# Altium footprint library Connectors.PcbLib: 120 footprints (part 2 of 8)
Each footprint in its own frame and in the unit in brackets; x right, y up, seen from the top. Pads: shape width x height; smd on the part's side, far side on the other; paste and mask are expansions set on the pad; w line width, h text height; cw(c..) or ccw(c..) is an arc to the next point about the centre after c.
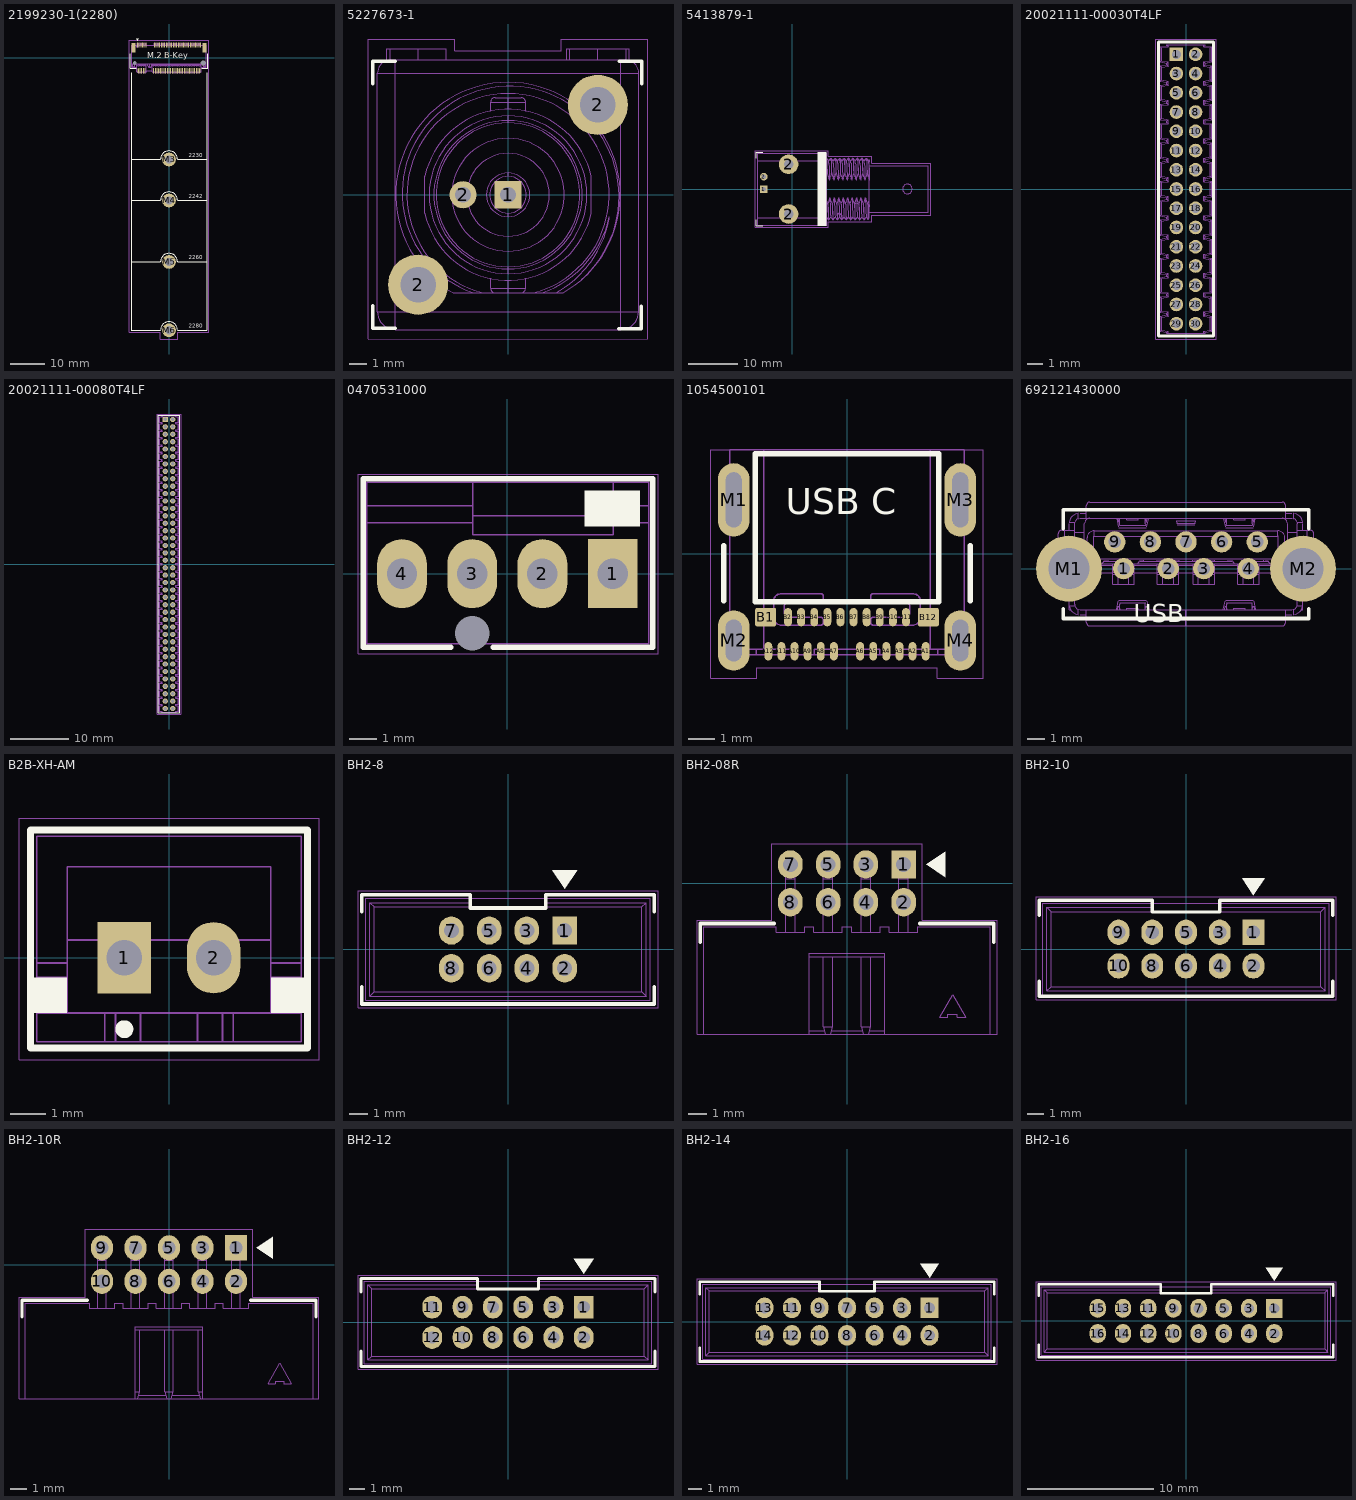
[diagram p1: the footprints below, top view; thin cyan lines are the x and y axes]

## 2199230-1(2280) [mm] "TE Conn M.2 B Key"
pads (75):
  rect 0x0 hole 1.1 unplated paste-2539.97 mask+0.05: 0(-10,-1.5)
  rect 0x0 hole 1.6 unplated paste-2539.97 mask+0.05: 0(10,-1.5)
  rect 0.3x1.55 smd paste+0 mask+0.05: 1(-9.25,3.775)
  oval 0.3x1.55 smd paste+0 mask+0.05: 2(-9,-3.775) 3(-8.75,3.775) 4(-8.5,-3.775) 5(-8.25,3.775) 6(-8,-3.775) 7(-7.75,3.775) 8(-7.5,-3.775) 9(-7.25,3.775) 10(-7,-3.775) 11(-6.75,3.775) 20(-4.5,-3.775) 21(-4.25,3.775) 22(-4,-3.775) 23(-3.75,3.775) 24(-3.5,-3.775) 25(-3.25,3.775) 26(-3,-3.775) 27(-2.75,3.775) 28(-2.5,-3.775) 29(-2.25,3.775) 30(-2,-3.775) 31(-1.75,3.775) 32(-1.5,-3.775) 33(-1.25,3.775) 34(-1,-3.775) 35(-0.75,3.775) 36(-0.5,-3.775) 37(-0.25,3.775) 38(0,-3.775) 39(0.25,3.775) 40(0.5,-3.775) 41(0.75,3.775) 42(1,-3.775) 43(1.25,3.775) 44(1.5,-3.775) 45(1.75,3.775) 46(2,-3.775) 47(2.25,3.775) 48(2.5,-3.775) 49(2.75,3.775) 50(3,-3.775) 51(3.25,3.775) 52(3.5,-3.775) 53(3.75,3.775) 54(4,-3.775) 55(4.25,3.775) 56(4.5,-3.775) 57(4.75,3.775) 58(5,-3.775) 59(5.25,3.775) 60(5.5,-3.775) 61(5.75,3.775) 62(6,-3.775) 63(6.25,3.775) 64(6.5,-3.775) 65(6.75,3.775) 66(7,-3.775) 67(7.25,3.775) 68(7.5,-3.775) 69(7.75,3.775) 70(8,-3.775) 71(8.25,3.775) 72(8.5,-3.775) 73(8.75,3.775) 74(9,-3.775) 75(9.25,3.775)
  rect 1.2x2.75 smd paste+0 mask+0.05: M1(-10.35,3) M2(10.35,3)
  round 4 hole 2.4 paste-2539.97 mask+0.05: M3(0,-29.75) M4(0,-41.75) M5(0,-59.75) M6(0,-79.75)
Top Overlay:
  region: -9.25,5.025 -8.85,5.525 -9.65,5.525
  lines w0.2: -11.3,1.2 -11.3,-3.1 -9.6,-3.1 ; -11,-59.75 -2.5,-59.75 cw(c0,-59.75) 2.5,-59.75 11,-59.75 ; -11,-41.75 -2.5,-41.75 cw(c0,-41.75) 2.5,-41.75 11,-41.75 ; -11,-29.75 -2.5,-29.75 cw(c0,-29.75) 2.5,-29.75 11,-29.75 ; -11,-4.35 -11,-79.75 -2.5,-79.75 cw(c0,-79.75) 2.5,-79.75 11,-79.75 11,-4.35 ; 9.6,-3.1 11.3,-3.1 11.3,1.2
  text "M.2 B-Key" at -6.373,-0.683 h3
  text "2280" at 5.75,-79.464 h2
  text "2260" at 5.75,-59.464 h2
  text "2242" at 5.75,-41.464 h2
  text "2230" at 5.75,-29.464 h2
Top Courtyard:
  lines w0.025: -11.6,-80.3 -2.5,-80.3 -2.5,-82.3 2.5,-82.3 2.5,-80.3 11.6,-80.3 11.6,5.2 -11.6,5.2 -11.6,-80.3
Top Assembly:
  drawing of 707 lines, arcs and shapes, not listed
  text ".Designator" at -4.511,0.547 h2
3D body "2199230-1.x_t": height 4.09, standoff -0.62, extent -10.95,-4.35 10.95,4.35

## 5227673-1 [mm] "BNC Connector"
height 0.6
pads (4):
  rect 1.53x1.53 hole 0.9: 1(0,0)
  round 3.4 hole 2: 2(-5.08,-5.08) 2(5.08,5.08)
  round 1.53 hole 0.9: 2(-2.54,0)
Top Overlay:
  lines w0.2: -7.65,-6.28 -7.65,-7.55 -6.38,-7.55 ; -7.65,6.28 -7.65,7.55 -6.38,7.55 ; 6.255,-7.575 7.525,-7.575 7.525,-6.305 ; 6.28,7.55 7.55,7.55 7.55,6.28
Top Courtyard:
  lines w0.025: -7.9,-8.15 7.9,-8.15 7.9,8.8 3,8.8 3,8.15 -3,8.15 -3,8.8 -7.9,8.8 -7.9,-8.15
Top Assembly:
  drawing of 540 lines, arcs and shapes, not listed
  text ".Designator" at -6.763,8.321 h3
3D body "c-5227673-1-b-3d.x_t": height 35.65, standoff -5.64, extent -7.38,-7.62 7.38,8.26

## 5413879-1 [mm] "BNC Connector"
height 0.6
pads (4):
  rect 1.53x1.53 hole 0.9: 1(-5.779,0)
  round 1.53 hole 0.9: 2(-5.779,2.54)
  round 4 hole 2 unplated: 2(-0.699,-5.08) 2(-0.699,5.08)
Top Overlay:
  rectangle: 5.2,-7.546 7.002,7.579
  lines w0.2: -7.274,-6.251 -7.274,-7.521 -6.004,-7.521 ; -7.274,6.309 -7.274,7.579 -6.004,7.579
Top Courtyard:
  lines w0.05: -7.5,-7.8 7.4,-7.8 7.4,-6.7 16.3,-6.7 16.3,-5.3 28.3,-5.3 28.3,5.3 16.3,5.3 16.3,6.7 7.4,6.7 7.4,7.8 -7.5,7.8 -7.5,-7.8
Top Assembly:
  drawing of 1243 lines, arcs and shapes, not listed
  text ".Designator" at -8.645,-0.877 h4
3D body "5413879-1.x_t": height 12.79, standoff -4.02, extent -7.048,-7.378 27.877,7.379

## 20021111-00030T4LF [mm] "Header 2x30 1.27 mm, VT TH"
height 5.55
pads (30):
  rect 0.9x0.9 hole 0.6: 1(-0.635,8.89)
  round 0.9 hole 0.6: 2(0.635,8.89) 3(-0.635,7.62) 4(0.635,7.62) 5(-0.635,6.35) 6(0.635,6.35) 7(-0.635,5.08) 8(0.635,5.08) 9(-0.635,3.81) 10(0.635,3.81) 11(-0.635,2.54) 12(0.635,2.54) 13(-0.635,1.27) 14(0.635,1.27) 15(-0.635,0) 16(0.635,0) 17(-0.635,-1.27) 18(0.635,-1.27) 19(-0.635,-2.54) 20(0.635,-2.54) 21(-0.635,-3.81) 22(0.635,-3.81) 23(-0.635,-5.08) 24(0.635,-5.08) 25(-0.635,-6.35) 26(0.635,-6.35) 27(-0.635,-7.62) 28(0.635,-7.62) 29(-0.635,-8.89) 30(0.635,-8.89)
Top Overlay:
  lines w0.2: -1.8,-9.7 1.8,-9.7 1.8,9.7 -1.8,9.7 -1.8,-9.7
Top Courtyard:
  lines w0.025: -2,-9.9 -2,9.9 2,9.9 2,-9.9 -2,-9.9
Top Assembly:
  drawing of 728 lines, arcs and shapes, not listed
  text ".Designator" at 3.453,-4.511 h2
3D body "20021111-00030T4LF.x_t": height 5.55, standoff -2.3, extent -1.715,-9.525 1.715,9.525

## 20021111-00080T4LF [mm] "Header 2x40 1.27 mm, VT TH"
height 5.55
pads (80):
  rect 0.9x0.9 hole 0.6: 1(-0.635,24.765)
  round 0.9 hole 0.6: 2(0.635,24.765) 3(-0.635,23.495) 4(0.635,23.495) 5(-0.635,22.225) 6(0.635,22.225) 7(-0.635,20.955) 8(0.635,20.955) 9(-0.635,19.685) 10(0.635,19.685) 11(-0.635,18.415) 12(0.635,18.415) 13(-0.635,17.145) 14(0.635,17.145) 15(-0.635,15.875) 16(0.635,15.875) 17(-0.635,14.605) 18(0.635,14.605) 19(-0.635,13.335) 20(0.635,13.335) 21(-0.635,12.065) 22(0.635,12.065) 23(-0.635,10.795) 24(0.635,10.795) 25(-0.635,9.525) 26(0.635,9.525) 27(-0.635,8.255) 28(0.635,8.255) 29(-0.635,6.985) 30(0.635,6.985) 31(-0.635,5.715) 32(0.635,5.715) 33(-0.635,4.445) 34(0.635,4.445) 35(-0.635,3.175) 36(0.635,3.175) 37(-0.635,1.905) 38(0.635,1.905) 39(-0.635,0.635) 40(0.635,0.635) 41(-0.635,-0.635) 42(0.635,-0.635) 43(-0.635,-1.905) 44(0.635,-1.905) 45(-0.635,-3.175) 46(0.635,-3.175) 47(-0.635,-4.445) 48(0.635,-4.445) 49(-0.635,-5.715) 50(0.635,-5.715) 51(-0.635,-6.985) 52(0.635,-6.985) 53(-0.635,-8.255) 54(0.635,-8.255) 55(-0.635,-9.525) 56(0.635,-9.525) 57(-0.635,-10.795) 58(0.635,-10.795) 59(-0.635,-12.065) 60(0.635,-12.065) 61(-0.635,-13.335) 62(0.635,-13.335) 63(-0.635,-14.605) 64(0.635,-14.605) 65(-0.635,-15.875) 66(0.635,-15.875) 67(-0.635,-17.145) 68(0.635,-17.145) 69(-0.635,-18.415) 70(0.635,-18.415) 71(-0.635,-19.685) 72(0.635,-19.685) 73(-0.635,-20.955) 74(0.635,-20.955) 75(-0.635,-22.225) 76(0.635,-22.225) 77(-0.635,-23.495) 78(0.635,-23.495) 79(-0.635,-24.765) 80(0.635,-24.765)
Top Overlay:
  lines w0.2: -1.8,-25.5 -1.8,25.5 1.8,25.5 1.8,-25.5 -1.8,-25.5
Top Courtyard:
  lines w0.025: -2,-25.7 -2,25.7 2,25.7 2,-25.7 -2,-25.7
Top Assembly:
  drawing of 1928 lines, arcs and shapes, not listed
  text ".Designator" at 3.453,-4.511 h2
3D body "20021111-00080T4LF.x_t": height 5.55, standoff -2.3, extent -1.715,-25.4 1.715,25.4

## 0470531000 [mm]
height 0.6
pads (5):
  round 0 hole 1.25: 0(-1.27,-2.16)
  rect 1.8x2.5 hole 1.1: 1(3.81,0)
  oval 1.8x2.5 hole 1.1: 2(1.27,0) 3(-1.27,0) 4(-3.81,0)
Top Overlay:
  rectangle: 2.8,1.7 4.8,3
  lines w0.2: -2.05,-2.667 -5.207,-2.667 -5.207,-2.286 -5.207,3.429 5.258,3.429 5.258,-2.667 -0.5,-2.667
Top Courtyard:
  lines w0.025: -5.4,-2.9 5.45,-2.9 5.45,3.6 -5.4,3.6 -5.4,-2.9
Top Assembly:
  lines w0.05: -1.25,1.85 -5.08,1.85 ; -1.25,2.45 -5.08,2.45 ; 3.83,1.85 5.12,1.85 ; 3.83,2.45 5.12,2.45 ; -5.08,1.85 -5.08,-2.54 5.12,-2.54 5.12,1.85 ; -5.08,1.85 -5.08,2.45 ; -5.08,2.45 -5.08,3.3 -1.25,3.3 ; -4.115,-0.325 -4.115,0.325 ; -4.115,-0.325 -3.465,-0.325 ; -4.115,-0.325 -3.914,-0.124 ; -4.115,0.325 -3.465,0.325 ; -4.115,0.325 -3.914,0.124 ; -3.914,-0.124 -3.914,0.124 ; -3.914,-0.124 -3.666,-0.124 ; -3.914,0.124 -3.666,0.124 ; -3.666,-0.124 -3.666,0.124 ; -3.666,-0.124 -3.465,-0.325 ; -3.666,0.124 -3.465,0.325 ; -3.465,-0.325 -3.465,0.325 ; -1.575,-0.325 -0.925,-0.325 ; -1.575,-0.325 -1.575,0.325 ; -1.575,-0.325 -1.374,-0.124 ; -1.575,0.325 -0.925,0.325 ; -1.575,0.325 -1.374,0.124 ; -1.374,-0.124 -1.126,-0.124 ; -1.374,-0.124 -1.374,0.124 ; -1.374,0.124 -1.126,0.124 ; -1.25,2.1 3.83,2.1 ; -1.25,2.1 -1.25,1.4 3.83,1.4 3.83,2.1 ; -1.25,2.1 -1.25,3.3 ; -1.25,3.3 3.83,3.3 ; -1.126,-0.124 -1.126,0.124 ; -1.126,-0.124 -0.925,-0.325 ; -1.126,0.124 -0.925,0.325 ; -0.925,-0.325 -0.925,0.325 ; 0.965,-0.325 0.965,0.325 ; 0.965,-0.325 1.615,-0.325 ; 0.965,-0.325 1.166,-0.124 ; 0.965,0.325 1.615,0.325 ; 0.965,0.325 1.166,0.124 ; 1.166,-0.124 1.166,0.124 ; 1.166,-0.124 1.414,-0.124 ; 1.166,0.124 1.414,0.124 ; 1.414,-0.124 1.414,0.124 ; 1.414,-0.124 1.615,-0.325 ; 1.414,0.124 1.615,0.325 ; 1.615,-0.325 1.615,0.325 ; 3.505,-0.325 3.505,0.325 ; 3.505,-0.325 4.155,-0.325 ; 3.505,-0.325 3.706,-0.124 ; 3.505,0.325 4.155,0.325 ; 3.505,0.325 3.706,0.124 ; 3.706,-0.124 3.706,0.124 ; 3.706,-0.124 3.954,-0.124 ; 3.706,0.124 3.954,0.124 ; 3.83,2.1 3.83,3.3 ; 3.83,3.3 5.12,3.3 5.12,2.45 ; 3.954,-0.124 3.954,0.124 ; 3.954,-0.124 4.155,-0.325 ; 3.954,0.124 4.155,0.325 ; 4.155,-0.325 4.155,0.325 ; 5.12,1.85 5.12,2.45
  text ".Designator" at -4.257,-1.85 h2
3D body "470531000.x_t": height 10.5, standoff -3, extent -5.08,-2.54 5.12,3.3

## 1054500101 [mm] "USB TYPE C"
pads (28):
  oval 0.3x0.7 smd paste+0 mask+0.05: A1(3,-3.727) A2(2.5,-3.727) A3(2,-3.727) A4(1.5,-3.727) A5(1,-3.727) A6(0.5,-3.727) A7(-0.5,-3.727) A8(-1,-3.727) A9(-1.5,-3.727) A10(-2,-3.727) A11(-2.5,-3.727) A12(-3,-3.727) B2(-2.25,-2.427) B3(-1.75,-2.427) B4(-1.25,-2.427) B5(-0.75,-2.427) B6(-0.25,-2.427) B7(0.25,-2.427) B8(0.75,-2.427) B9(1.25,-2.427) B10(1.75,-2.427) B11(2.25,-2.427)
  rrect20% 0.8x0.7 smd paste+0 mask+0.05: B1(-3.1,-2.427) B12(3.1,-2.427)
  oval 1.2x2.8 hole 0.6 slot 2.1 at 90 deg paste-2539.97 mask+0.05: M1(-4.32,2.043) M3(4.32,2.043)
  oval 1.2x2.3 hole 0.6 slot 1.6 at 90 deg paste-2539.97 mask+0.05: M2(-4.32,-3.317) M4(4.32,-3.317)
Top Overlay:
  lines w0.2: -4.7,-1.8 -4.7,0.3 ; 4.7,-1.8 4.7,0.3 ; -3.5,-1.842 3.5,-1.842 3.5,3.808 -3.5,3.808 -3.5,-1.842
  text "USB C" at -2.333,1.5 h1
Top Courtyard:
  lines w0.025: -5.2,-4.75 -3.45,-4.75 -3.45,-4.35 3.45,-4.35 3.45,-4.75 5.2,-4.75 5.2,3.95 -5.2,3.95 -5.2,-4.75
Top Assembly:
  lines w0.05: -4.17,-3.66 -4.17,-3.86 -4.47,-3.86 -4.47,-3.66 ; -3.97,-3.66 -3.97,-3.86 -3.47,-3.86 ; -3.47,-3.66 -3.47,-3.86 ; -3.1,-3.86 -3.1,-3.95 -2.9,-3.95 -2.9,-3.86 ; -2.6,-3.86 -2.6,-3.95 -2.4,-3.95 -2.4,-3.86 ; -2.1,-3.86 -2.1,-3.95 -1.9,-3.95 -1.9,-3.86 ; -1.6,-3.86 -1.6,-3.95 -1.4,-3.95 -1.4,-3.86 ; -1.1,-3.86 -1.1,-3.95 -0.9,-3.95 -0.9,-3.86 ; -0.6,-3.86 -0.6,-3.95 -0.4,-3.95 -0.4,-3.86 ; 0.4,-3.86 0.4,-3.95 0.6,-3.95 0.6,-3.86 ; 0.9,-3.86 0.9,-3.95 1.1,-3.95 1.1,-3.86 ; 1.4,-3.86 1.4,-3.95 1.6,-3.95 1.6,-3.86 ; 1.9,-3.86 1.9,-3.95 2.1,-3.95 2.1,-3.86 ; 2.4,-3.86 2.4,-3.95 2.6,-3.95 2.6,-3.86 ; 2.9,-3.86 2.9,-3.95 3.1,-3.95 3.1,-3.86 ; 3.47,-3.66 3.47,-3.86 ; 3.97,-3.66 3.97,-3.86 3.47,-3.86 ; 4.17,-3.66 4.17,-3.86 4.47,-3.86 4.47,-3.66 ; -4.47,-3.66 -4.47,3.95 -3.17,3.95 ; -4.47,-3.66 -3.17,-3.66 ; -3.47,-3.86 -2.05,-3.86 ; -3.17,-3.66 -3.17,3.95 ; -3.17,-3.66 -2.05,-3.66 -2.05,-3.86 ; -3.17,3.95 3.17,3.95 ; -2.05,-3.86 -1.25,-3.86 ; -1.25,-3.86 -1.25,-3.66 1.25,-3.66 1.25,-3.86 ; -1.25,-3.86 1.25,-3.86 ; 1.25,-3.86 2.05,-3.86 ; 2.05,-3.86 2.05,-3.66 3.17,-3.66 ; 2.05,-3.86 3.47,-3.86 ; 3.17,-3.66 3.17,3.95 ; 3.17,-3.66 4.47,-3.66 ; 3.17,3.95 4.47,3.95 4.47,-3.66 ; -2.8,-2.43 ccw(c-2.5,-2.43) -2.5,-2.73 -1,-2.73 ccw(c-1,-2.63) -0.9,-2.63 -0.9,-2.53 ccw(c-1,-2.53) -1,-2.43 -2.2,-2.43 cw(c-2.2,-2.23) -2.4,-2.23 -2.4,-2.03 cw(c-2.2,-2.03) -2.2,-1.83 -1,-1.83 ccw(c-1,-1.73) -0.9,-1.73 -0.9,-1.63 ccw(c-1,-1.63) -1,-1.53 -2.5,-1.53 ccw(c-2.5,-1.83) -2.8,-1.83 -2.8,-2.43 ; 0.9,-2.63 ccw(c1,-2.63) 1,-2.73 2.5,-2.73 ccw(c2.5,-2.43) 2.8,-2.43 2.8,-1.83 ccw(c2.5,-1.83) 2.5,-1.53 1,-1.53 ccw(c1,-1.63) 0.9,-1.63 0.9,-1.73 ccw(c1,-1.73) 1,-1.83 2.2,-1.83 cw(c2.2,-2.03) 2.4,-2.03 2.4,-2.23 cw(c2.2,-2.23) 2.2,-2.43 1,-2.43 ccw(c1,-2.53) 0.9,-2.53 0.9,-2.63
  text ".Designator" at -4.511,-0.453 h2
3D body "1054500101.STEP": height 3.18, standoff -0.78, extent -4.47,-3.95 4.47,3.95

## 692121430000 [mm] "USB 3.0 Type A Vertical THR"
pads (11):
  round 1.2 hole 0.7: 1(-3.5,0) 2(-1,0) 3(1,0) 4(3.5,0) 5(4,1.5) 6(2,1.5) 7(0,1.5) 8(-2,1.5) 9(-4,1.5)
  round 3.7 hole 2.3: M1(-6.57,0) M2(6.57,0)
Top Overlay:
  lines w0.2: -6.9,-2.25 -6.9,-2.8 6.9,-2.8 6.9,-2.25 ; -6.9,2.25 -6.9,3.3 6.9,3.3 6.9,2.25
  text "USB" at -2.92,-3.004 h1
Top Assembly:
  drawing of 347 lines, arcs and shapes, not listed
  text ".DESIGNATOR" at -6.073,-2.191 h2
3D body "692121430000 (rev1).stp": height 15, standoff -3.77, extent -7.8,-3.215 7.8,3.735

## B2B-XH-AM [mm]
height 7
pads (2):
  rect 1.5x2 hole 1 mask+0.05: 1(-1.25,0)
  oval 1.5x2 hole 1 mask+0.05: 2(1.25,0)
Top Overlay:
  circle w0.25: c-1.25,-2 r0.125
  region: 3.875,-0.55 2.85,-0.55 2.85,-1.55 3.875,-1.55
  rectangle: -3.875,-1.55 -2.85,-0.55
  lines w0.2: 3.875,3.175 3.875,3.575 ; 3.875,3.575 -3.875,3.575 -3.875,-2.525 3.875,-2.525 3.875,3.575
Top Courtyard:
  lines w0.025: -4.2,-2.85 4.2,-2.85 4.2,3.9 -4.2,3.9 -4.2,-2.85
Top Assembly:
  lines w0.05: -3.7,-1.55 3.7,-1.55 ; -3.7,-0.55 -2.85,-0.55 ; -3.7,-0.15 -2.85,-0.15 ; -2.85,-1.55 -2.85,2.55 2.85,2.55 2.85,-1.55 ; -2.85,0.5 2.85,0.5 ; -1.8,-2.35 -1.8,-1.55 ; -1.5,-2.35 -1.5,-1.55 ; -0.8,-2.35 -0.8,-1.55 ; 0.8,-2.35 0.8,-1.55 ; 1.5,-2.35 1.5,-1.55 ; 1.8,-2.35 1.8,-1.55 ; 2.85,-0.55 3.7,-0.55 ; 2.85,-0.15 3.7,-0.15 ; -1.57,-0.32 -0.93,-0.32 ; -1.57,-0.32 -1.37,-0.12 ; -1.57,-0.32 -1.57,0.32 ; -1.57,0.32 -1.37,0.12 ; -1.57,0.32 -0.93,0.32 ; -1.37,-0.12 -1.13,-0.12 ; -1.37,-0.12 -1.37,0.12 ; -1.37,0.12 -1.13,0.12 ; -1.13,-0.12 -0.93,-0.32 ; -1.13,-0.12 -1.13,0.12 ; -1.13,0.12 -0.93,0.32 ; -0.93,-0.32 -0.93,0.32 ; 0.93,-0.32 1.57,-0.32 ; 0.93,-0.32 1.13,-0.12 ; 0.93,-0.32 0.93,0.32 ; 0.93,0.32 1.57,0.32 ; 0.93,0.32 1.13,0.12 ; 1.13,-0.12 1.13,0.12 ; 1.13,-0.12 1.37,-0.12 ; 1.13,0.12 1.37,0.12 ; 1.37,-0.12 1.57,-0.32 ; 1.37,-0.12 1.37,0.12 ; 1.37,0.12 1.57,0.32 ; 1.57,-0.32 1.57,0.32 ; -3.7,-2.35 -3.7,3.4 3.7,3.4 3.7,-2.35 -3.7,-2.35
  text ".Designator" at -4.511,-2.953 h2
3D body "B2B-XH.x_t": height 7, standoff -3.4, extent -3.7,-2.35 3.7,3.4

## BH2-8 [mm]
pads (8):
  rect 1.3x1.5 hole 0.8: 1(3,1)
  oval 1.3x1.5 hole 0.8: 2(3,-1) 3(1,1) 4(1,-1) 5(-1,1) 6(-1,-1) 7(-3,1) 8(-3,-1)
Top Overlay:
  region: 3,3.2 2.333,4.2 3.667,4.2
  lines w0.2: -7.75,-2 -7.75,-2.9 7.75,-2.9 7.75,-2 ; -7.75,2 -7.75,2.9 -2,2.9 -2,2.2 2,2.2 2,2.9 7.75,2.9 7.75,2
Top Courtyard:
  lines w0.025: -7.95,-3.1 -7.95,3.1 7.95,3.1 7.95,-3.1 -7.95,-3.1
Top Assembly:
  drawing of 185 lines, arcs and shapes, not listed
  text ".Designator" at -4.511,3.547 h2
3D body "DS1014-08SF1B.x_t": height 5.65, standoff -2.45, extent -7.55,-2.7 7.55,2.7

## BH2-08R [mm]
pads (8):
  rect 1.3x1.5 hole 0.8: 1(3,1)
  oval 1.3x1.5 hole 0.8: 2(3,-1) 3(1,1) 4(1,-1) 5(-1,1) 6(-1,-1) 7(-3,1) 8(-3,-1)
Top Overlay:
  region: 4.2,1 5.2,1.667 5.2,0.333
  lines w0.2: -7.775,-3.125 -7.775,-2.125 -3.875,-2.125 ; 3.875,-2.125 7.775,-2.125 7.775,-3.125
Top Courtyard:
  lines w0.025: -7.95,-8 7.95,-8 7.95,-1.95 4,-1.95 4,2.1 -4,2.1 -4,-1.95 -7.95,-1.95 -7.95,-8
Top Assembly:
  lines w0.05: -3.25,-2.6 -3.25,0.25 ; -2.75,-2.6 -2.75,0.25 ; -2,-7.8 -1.196,-7.8 ; -2,-3.9 2,-3.9 ; -1.25,-3.9 -1.25,-7.6 ; -1.25,-2.6 -1.25,0.25 ; -0.804,-7.8 0.804,-7.8 ; -0.75,-3.9 -0.75,-7.6 ; -0.75,-2.6 -0.75,0.25 ; 0.75,-3.9 0.75,-7.6 ; 0.75,-2.6 0.75,0.25 ; 1.196,-7.8 2,-7.8 ; 1.25,-3.9 1.25,-7.6 ; 1.25,-2.6 1.25,0.25 ; 2.75,-2.6 2.75,0.25 ; 3.25,-2.6 3.25,0.25 ; -3.25,0.25 -2.75,0.25 ; -3.25,0.25 -3.25,1.25 -2.75,1.25 -2.75,0.25 ; -2,-8 -2,-3.7 2,-3.7 2,-8 ; -2,-8 -7.6,-8 -7.6,-2.3 -3.75,-2.3 -3.75,-2.6 -2.25,-2.6 -2.25,-2.3 -1.75,-2.3 -1.75,-2.6 -0.25,-2.6 -0.25,-2.3 0.25,-2.3 0.25,-2.6 1.75,-2.6 1.75,-2.3 2.25,-2.3 2.25,-2.6 3.75,-2.6 3.75,-2.3 7.6,-2.3 7.6,-8 2,-8 ; -2,-8 -1.143,-8 ; -1.25,-7.6 -0.75,-7.6 ; -1.25,-7.6 -1.143,-8 ; -1.25,0.25 -0.75,0.25 ; -1.25,0.25 -1.25,1.25 -0.75,1.25 -0.75,0.25 ; -1.143,-8 -0.857,-8 ; -0.857,-8 0.857,-8 ; -0.857,-8 -0.75,-7.6 ; 0.75,-7.6 1.25,-7.6 ; 0.75,-7.6 0.857,-8 ; 0.75,0.25 1.25,0.25 ; 0.75,0.25 0.75,1.25 1.25,1.25 1.25,0.25 ; 0.857,-8 1.143,-8 ; 1.143,-8 2,-8 ; 1.143,-8 1.25,-7.6 ; 2.75,0.25 3.25,0.25 ; 2.75,0.25 2.75,1.25 3.25,1.25 3.25,0.25 ; 4.907,-7.1 5.6,-5.9 6.293,-7.1 5.85,-7.1 5.85,-6.95 5.35,-6.95 5.35,-7.1 4.907,-7.1
  text ".Designator" at -9.011,-5.453 h2
3D body "L-KLS1-202B-08-R-B.x_t": height 5.69, standoff -2.61, extent -8.6,-8 8.6,1.25

## BH2-10 [mm]
pads (10):
  rect 1.3x1.5 hole 0.8: 1(4,1)
  oval 1.3x1.5 hole 0.8: 2(4,-1) 3(2,1) 4(2,-1) 5(0,1) 6(0,-1) 7(-2,1) 8(-2,-1) 9(-4,1) 10(-4,-1)
Top Overlay:
  region: 4,3.2 3.333,4.2 4.667,4.2
  lines w0.2: -8.7,-1.9 -8.7,-2.8 8.7,-2.8 8.7,-1.9 ; -8.7,2 -8.7,2.9 -2,2.9 -2,2.2 2,2.2 2,2.9 8.7,2.9 8.7,2
Top Courtyard:
  lines w0.025: -8.9,-3 8.9,-3 8.9,3.1 -8.9,3.1 -8.9,-3
Top Assembly:
  lines w0.05: -8.25,-2.475 -8,-2.225 ; -8.25,-2.475 -8.25,2.475 ; -8.25,-2.475 8.25,-2.475 ; -8.25,2.475 -8,2.225 ; -8.25,2.475 -2,2.475 ; -8,-2.225 -8,2.225 ; -8,-2.225 8,-2.225 ; -8,2.225 -2,2.225 -2,2.475 ; -4.25,-1.25 -4.1,-1.1 ; -4.25,-1.25 -4.25,-0.75 ; -4.25,-1.25 -3.75,-1.25 ; -4.25,-0.75 -4.1,-0.9 ; -4.25,-0.75 -3.75,-0.75 ; -4.25,0.75 -4.1,0.9 ; -4.25,0.75 -4.25,1.25 ; -4.25,0.75 -3.75,0.75 ; -4.25,1.25 -4.1,1.1 ; -4.25,1.25 -3.75,1.25 ; -4.1,-1.1 -4.1,-0.9 ; -4.1,-1.1 -3.9,-1.1 ; -4.1,-0.9 -3.9,-0.9 ; -4.1,0.9 -4.1,1.1 ; -4.1,0.9 -3.9,0.9 ; -4.1,1.1 -3.9,1.1 ; -3.9,-1.1 -3.75,-1.25 ; -3.9,-1.1 -3.9,-0.9 ; -3.9,-0.9 -3.75,-0.75 ; -3.9,0.9 -3.75,0.75 ; -3.9,0.9 -3.9,1.1 ; -3.9,1.1 -3.75,1.25 ; -3.75,-1.25 -3.75,-0.75 ; -3.75,0.75 -3.75,1.25 ; -2.25,-1.25 -2.1,-1.1 ; -2.25,-1.25 -2.25,-0.75 ; -2.25,-1.25 -1.75,-1.25 ; -2.25,-0.75 -2.1,-0.9 ; -2.25,-0.75 -1.75,-0.75 ; -2.25,0.75 -1.75,0.75 ; -2.25,0.75 -2.1,0.9 ; -2.25,0.75 -2.25,1.25 ; -2.25,1.25 -2.1,1.1 ; -2.25,1.25 -1.75,1.25 ; -2.1,-1.1 -1.9,-1.1 ; -2.1,-1.1 -2.1,-0.9 ; -2.1,-0.9 -1.9,-0.9 ; -2.1,0.9 -1.9,0.9 ; -2.1,0.9 -2.1,1.1 ; -2.1,1.1 -1.9,1.1 ; -2,2.475 -2,2.725 ; -2,2.725 -8.5,2.725 -8.5,-2.725 8.5,-2.725 8.5,2.725 2,2.725 ; -2,2.725 2,2.725 ; -1.9,-1.1 -1.75,-1.25 ; -1.9,-1.1 -1.9,-0.9 ; -1.9,-0.9 -1.75,-0.75 ; -1.9,0.9 -1.9,1.1 ; -1.9,0.9 -1.75,0.75 ; -1.9,1.1 -1.75,1.25 ; -1.75,-1.25 -1.75,-0.75 ; -1.75,0.75 -1.75,1.25 ; -0.25,-1.25 -0.1,-1.1 ; -0.25,-1.25 -0.25,-0.75 ; -0.25,-1.25 0.25,-1.25 ; -0.25,-0.75 -0.1,-0.9 ; -0.25,-0.75 0.25,-0.75 ; -0.25,0.75 -0.1,0.9 ; -0.25,0.75 -0.25,1.25 ; -0.25,0.75 0.25,0.75 ; -0.25,1.25 -0.1,1.1 ; -0.25,1.25 0.25,1.25 ; -0.1,-1.1 0.1,-1.1 ; -0.1,-1.1 -0.1,-0.9 ; -0.1,-0.9 0.1,-0.9 ; -0.1,0.9 0.1,0.9 ; -0.1,0.9 -0.1,1.1 ; -0.1,1.1 0.1,1.1 ; 0.1,-1.1 0.1,-0.9 ; 0.1,-1.1 0.25,-1.25 ; 0.1,-0.9 0.25,-0.75 ; 0.1,0.9 0.25,0.75 ; 0.1,0.9 0.1,1.1 ; 0.1,1.1 0.25,1.25 ; 0.25,-1.25 0.25,-0.75 ; 0.25,0.75 0.25,1.25 ; 1.75,-1.25 2.25,-1.25 ; 1.75,-1.25 1.9,-1.1 ; 1.75,-1.25 1.75,-0.75 ; 1.75,-0.75 1.9,-0.9 ; 1.75,-0.75 2.25,-0.75 ; 1.75,0.75 1.9,0.9 ; 1.75,0.75 1.75,1.25 ; 1.75,0.75 2.25,0.75 ; 1.75,1.25 1.9,1.1 ; 1.75,1.25 2.25,1.25 ; 1.9,-1.1 2.1,-1.1 ; 1.9,-1.1 1.9,-0.9 ; 1.9,-0.9 2.1,-0.9 ; 1.9,0.9 2.1,0.9 ; 1.9,0.9 1.9,1.1 ; 1.9,1.1 2.1,1.1 ; 2,2.475 2,2.225 8,2.225 ; 2,2.475 8.25,2.475 ; 2,2.475 2,2.725 ; 2.1,-1.1 2.25,-1.25 ; 2.1,-1.1 2.1,-0.9 ; 2.1,-0.9 2.25,-0.75 ; 2.1,0.9 2.1,1.1 ; 2.1,0.9 2.25,0.75 ; 2.1,1.1 2.25,1.25 ; 2.25,-1.25 2.25,-0.75 ; 2.25,0.75 2.25,1.25 ; 3.75,-1.25 3.9,-1.1 ; 3.75,-1.25 3.75,-0.75 ; 3.75,-1.25 4.25,-1.25 ; 3.75,-0.75 3.9,-0.9 ; 3.75,-0.75 4.25,-0.75 ; 3.75,0.75 3.9,0.9 ; 3.75,0.75 3.75,1.25 ; 3.75,0.75 4.25,0.75 ; 3.75,1.25 3.9,1.1 ; 3.75,1.25 4.25,1.25 ; 3.9,-1.1 3.9,-0.9 ; 3.9,-1.1 4.1,-1.1 ; 3.9,-0.9 4.1,-0.9 ; 3.9,0.9 4.1,0.9 ; 3.9,0.9 3.9,1.1 ; 3.9,1.1 4.1,1.1 ; 4.1,-1.1 4.25,-1.25 ; 4.1,-1.1 4.1,-0.9 ; 4.1,-0.9 4.25,-0.75 ; 4.1,0.9 4.25,0.75 ; 4.1,0.9 4.1,1.1 ; 4.1,1.1 4.25,1.25 ; 4.25,-1.25 4.25,-0.75 ; 4.25,0.75 4.25,1.25 ; 8,-2.225 8.25,-2.475 ; 8,-2.225 8,2.225 ; 8,2.225 8.25,2.475 ; 8.25,-2.475 8.25,2.475
  text ".Designator" at -4.511,3.547 h2
3D body "DS1014-10SF1B.x_t": height 5.65, standoff -2.45, extent -8.55,-2.7 8.55,2.7

## BH2-10R [mm]
pads (10):
  rect 1.3x1.5 hole 0.8: 1(4,1)
  oval 1.3x1.5 hole 0.8: 2(4,-1) 3(2,1) 4(2,-1) 5(0,1) 6(0,-1) 7(-2,1) 8(-2,-1) 9(-4,1) 10(-4,-1)
Top Overlay:
  region: 5.2,1 6.2,1.667 6.2,0.333
  lines w0.2: -8.775,-3.125 -8.775,-2.125 -4.875,-2.125 ; 4.875,-2.125 8.775,-2.125 8.775,-3.125
Top Courtyard:
  lines w0.025: -8.95,-8 -8.95,-1.95 -5,-1.95 -5,2.1 5,2.1 5,-1.95 8.95,-1.95 8.95,-8 -8.95,-8
Top Assembly:
  lines w0.05: -4.25,-2.6 -4.25,1.25 -3.75,1.25 -3.75,-2.6 ; -4.25,0.25 -3.75,0.25 ; -2.25,-2.6 -2.25,1.25 -1.75,1.25 -1.75,-2.6 ; -2.25,0.25 -1.75,0.25 ; -2,-8 -2,-3.7 2,-3.7 2,-8 ; -2,-7.6 -1.75,-7.6 ; -2,-3.9 2,-3.9 ; -1.857,-8 -1.75,-7.6 ; -1.804,-7.8 -0.196,-7.8 ; -1.75,-3.9 -1.75,-7.6 ; -0.25,-3.9 -0.25,-7.6 ; -0.25,-2.6 -0.25,1.25 0.25,1.25 0.25,-2.6 ; -0.25,0.25 0.25,0.25 ; -0.143,-8 -0.25,-7.6 ; 0.143,-8 0.25,-7.6 ; 0.196,-7.8 1.804,-7.8 ; 0.25,-3.9 0.25,-7.6 ; 1.75,-3.9 1.75,-7.6 ; 1.75,-2.6 1.75,1.25 2.25,1.25 2.25,-2.6 ; 1.75,0.25 2.25,0.25 ; 1.857,-8 1.75,-7.6 ; 2,-7.6 1.75,-7.6 ; 3.75,-2.6 3.75,1.25 4.25,1.25 4.25,-2.6 ; 3.75,0.25 4.25,0.25 ; -0.25,-7.6 0.25,-7.6 ; -8.6,-8 8.6,-8 8.6,-2.3 4.75,-2.3 4.75,-2.6 3.25,-2.6 3.25,-2.3 2.75,-2.3 2.75,-2.6 1.25,-2.6 1.25,-2.3 0.75,-2.3 0.75,-2.6 -0.75,-2.6 -0.75,-2.3 -1.25,-2.3 -1.25,-2.6 -2.75,-2.6 -2.75,-2.3 -3.25,-2.3 -3.25,-2.6 -4.75,-2.6 -4.75,-2.3 -8.6,-2.3 -8.6,-8 ; 5.907,-7.1 6.6,-5.9 7.293,-7.1 6.85,-7.1 6.85,-6.95 6.35,-6.95 6.35,-7.1 5.907,-7.1
  text ".Designator" at -9.011,-5.453 h2
3D body "L-KLS1-202B-10-R-B.x_t": height 5.69, standoff -2.61, extent -8.6,-8 8.6,1.25

## BH2-12 [mm]
pads (12):
  rect 1.3x1.5 hole 0.8: 1(5,1)
  oval 1.3x1.5 hole 0.8: 2(5,-1) 3(3,1) 4(3,-1) 5(1,1) 6(1,-1) 7(-1,1) 8(-1,-1) 9(-3,1) 10(-3,-1) 11(-5,1) 12(-5,-1)
Top Overlay:
  region: 5,3.2 4.333,4.2 5.667,4.2
  lines w0.2: -9.7,-1.9 -9.7,-2.9 9.7,-2.9 9.7,-1.9 ; -9.7,2 -9.7,2.9 -2,2.9 -2,2.2 2,2.2 2,2.9 9.7,2.9 9.7,2
Top Courtyard:
  lines w0.025: -9.9,-3.1 -9.9,3.1 9.9,3.1 9.9,-3.1 -9.9,-3.1
Top Assembly:
  drawing of 168 lines, arcs and shapes, not listed
  text ".Designator" at -4.511,3.547 h2
3D body "DS1014-12SF1B.x_t": height 5.61, standoff -2.49, extent -9.55,-2.7 9.55,2.7

## BH2-14 [mm]
pads (14):
  rect 1.3x1.5 hole 0.8: 1(6,1)
  oval 1.3x1.5 hole 0.8: 2(6,-1) 3(4,1) 4(4,-1) 5(2,1) 6(2,-1) 7(0,1) 8(0,-1) 9(-2,1) 10(-2,-1) 11(-4,1) 12(-4,-1) 13(-6,1) 14(-6,-1)
Top Overlay:
  region: 6,3.2 5.333,4.2 6.667,4.2
  lines w0.2: -10.7,-1.9 -10.7,-2.9 10.7,-2.9 10.7,-1.9 ; -10.7,2 -10.7,2.9 -2,2.9 -2,2.2 2,2.2 2,2.9 10.7,2.9 10.7,2
Top Courtyard:
  lines w0.025: -10.9,-3.1 -10.9,3.1 10.9,3.1 10.9,-3.1 -10.9,-3.1
Top Assembly:
  drawing of 192 lines, arcs and shapes, not listed
  text ".Designator" at -4.511,3.547 h2
3D body "DS1014-14SF1B.x_t": height 5.61, standoff -2.49, extent -10.55,-2.7 10.55,2.7

## BH2-16 [mm]
pads (16):
  rect 1.3x1.5 hole 0.8: 1(7,1)
  oval 1.3x1.5 hole 0.8: 2(7,-1) 3(5,1) 4(5,-1) 5(3,1) 6(3,-1) 7(1,1) 8(1,-1) 9(-1,1) 10(-1,-1) 11(-3,1) 12(-3,-1) 13(-5,1) 14(-5,-1) 15(-7,1) 16(-7,-1)
Top Overlay:
  region: 7,3.2 6.333,4.2 7.667,4.2
  lines w0.2: -11.7,-1.9 -11.7,-2.9 11.7,-2.9 11.7,-1.9 ; -11.7,2 -11.7,2.9 -2,2.9 -2,2.2 2,2.2 2,2.9 11.7,2.9 11.7,2
Top Courtyard:
  lines w0.025: -11.9,-3.1 11.9,-3.1 11.9,3.1 -11.9,3.1 -11.9,-3.1
Top Assembly:
  drawing of 216 lines, arcs and shapes, not listed
  text ".Designator" at -4.511,3.547 h2
3D body "DS1014-16SF1B.x_t": height 5.61, standoff -2.49, extent -11.55,-2.7 11.55,2.7